# Altium footprint library Miscellaneous Header.PcbLib: 164 footprints (part 6 of 11)
Each footprint in its own frame and in the unit in brackets; x right, y up, seen from the top. Pads: shape width x height; smd on the part's side, far side on the other; paste and mask are expansions set on the pad; w line width, h text height; cw(c..) or ccw(c..) is an arc to the next point about the centre after c.
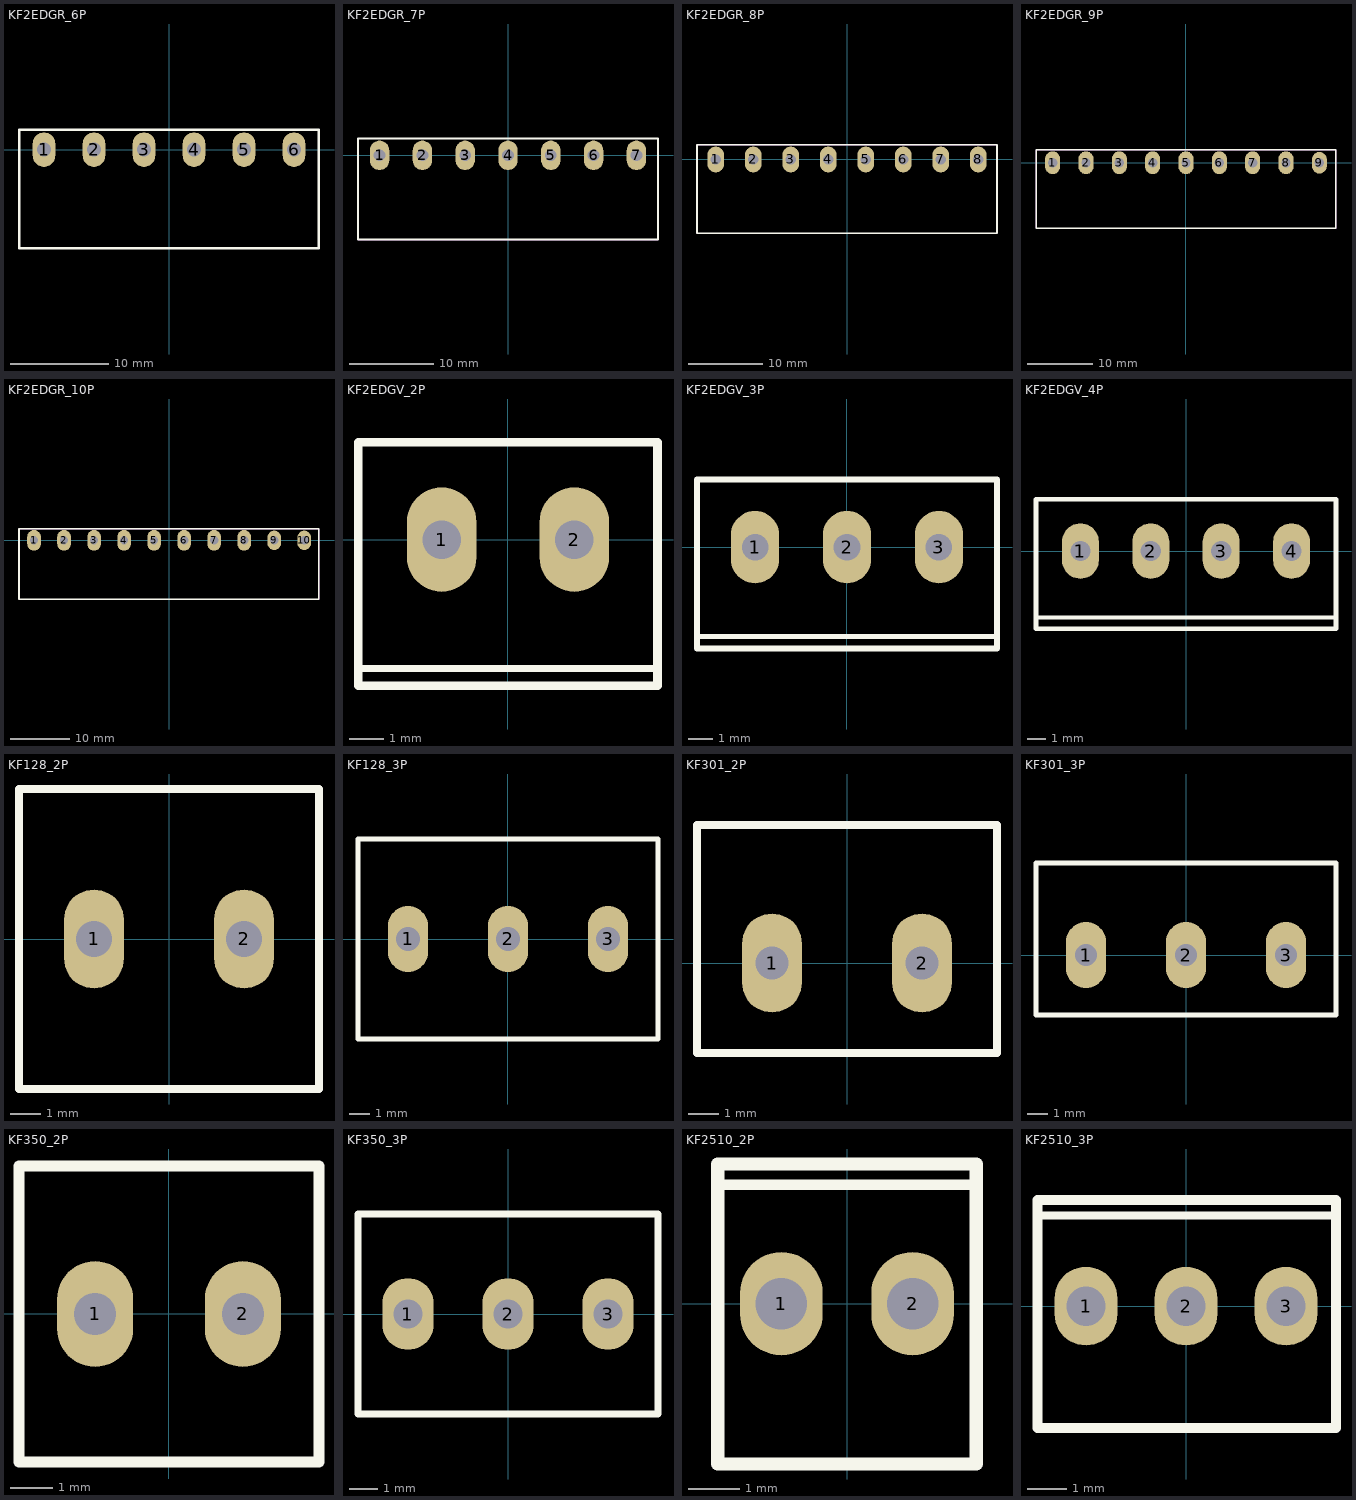
[diagram p5: the footprints below, top view; thin cyan lines are the x and y axes]

## KF2EDGR_6P [mm]
pads (6):
  oval 2.3x3.5 hole 1.4: 1(-12.7,0) 2(-7.62,0) 3(-2.54,0) 4(2.54,0) 5(7.62,0) 6(12.7,0)
Top Overlay:
  lines w0.254: -15.2,-10 -15.2,2 15.2,2 15.2,-10 -15.2,-10
Mechanical 15:
  lines w0.1: -15.24,-10 -15.24,2 15.24,2 15.24,-10 -15.24,-10
3D body: height 8.6, standoff -3.5, extent -15.24,-10.002 15.24,2

## KF2EDGR_7P [mm]
pads (7):
  oval 2.3x3.5 hole 1.4: 1(-15.24,0) 2(-10.16,0) 3(-5.08,0) 4(0,0) 5(5.08,0) 6(10.16,0) 7(15.24,0)
Top Overlay:
  lines w0.254: -17.8,-10 -17.8,2 17.8,2 17.8,-10 -17.8,-10
Mechanical 15:
  lines w0.1: -17.78,-10 17.78,-10 17.78,2 -17.78,2 -17.78,-10
3D body: height 8.6, standoff -3.5, extent -17.78,-10.002 17.78,2

## KF2EDGR_8P [mm]
pads (8):
  oval 2.3x3.5 hole 1.4: 1(-17.78,0) 2(-12.7,0) 3(-7.62,0) 4(-2.54,0) 5(2.54,0) 6(7.62,0) 7(12.7,0) 8(17.78,0)
Top Overlay:
  lines w0.254: -20.3,-10 -20.3,2 20.3,2 20.3,-10 -20.3,-10
Mechanical 15:
  lines w0.1: -20.32,-10 20.32,-10 20.32,2 -20.32,2 -20.32,-10
3D body: height 8.6, standoff -3.5, extent -20.32,-10.002 20.32,2

## KF2EDGR_9P [mm]
pads (9):
  oval 2.3x3.5 hole 1.4: 1(-20.32,0) 2(-15.24,0) 3(-10.16,0) 4(-5.08,0) 5(0,0) 6(5.08,0) 7(10.16,0) 8(15.24,0)
  oval 2.3x3.3 hole 1.4: 9(20.32,0)
Top Overlay:
  lines w0.254: -22.8,-10 22.8,-10 22.8,2 -22.8,2 -22.8,-10
Mechanical 15:
  lines w0.1: -22.86,-10 -22.86,2 22.86,2 22.86,-10 -22.86,-10
3D body: height 8.6, standoff -3.5, extent -22.86,-10.002 22.86,2

## KF2EDGR_10P [mm]
pads (10):
  oval 2.3x3.5 hole 1.4: 1(-22.86,0) 2(-17.78,0) 3(-12.7,0) 4(-7.62,0) 5(-2.54,0) 6(2.54,0) 7(7.62,0) 8(12.7,0)
  oval 2.3x3.3 hole 1.4: 9(17.78,0) 10(22.86,0)
Top Overlay:
  lines w0.254: -25.4,-10 25.3,-10 25.3,2 -25.4,2 -25.4,-10
Mechanical 15:
  lines w0.1: -25.4,-10 -25.4,2 25.36,2 25.36,-10 -25.4,-10
3D body: height 8.6, standoff -3.5, extent -25.4,-10.002 25.4,2

## KF2EDGV_2P [mm]
pads (2):
  oval 2x3 hole 1.1: 1(-1.905,0) 2(1.905,0)
Top Overlay:
  lines w0.2: -4.305,-3.7 4.295,-3.7
  lines w0.254: -4.305,-4.2 4.295,-4.2 4.295,2.8 -4.305,2.8 -4.305,-4.2
Mechanical 15:
  lines w0.1: -4.31,-4.2 4.31,-4.2 4.31,2.8 -4.31,2.8 -4.31,-4.2
3D body: height 9.2, standoff -3.5, extent -4.36,-4.2 4.35,2.8

## KF2EDGV_3P [mm]
pads (3):
  oval 2x3 hole 1.1: 1(-3.81,0) 2(0,0) 3(3.81,0)
Top Overlay:
  lines w0.2: -6.21,-3.7 6.215,-3.7
  lines w0.254: -6.21,-4.2 -6.21,2.8 6.215,2.8 6.215,-4.2 -6.21,-4.2
Mechanical 15:
  lines w0.1: -6.215,-4.2 -6.215,2.8 6.215,2.8 6.215,-4.2 -6.215,-4.2
3D body: height 9.2, standoff -3.5, extent -6.265,-4.2 6.255,2.8

## KF2EDGV_4P [mm]
pads (4):
  oval 2x3 hole 1.1: 1(-5.715,0) 2(-1.905,0) 3(1.905,0) 4(5.715,0)
Top Overlay:
  lines w0.2: -8.115,-3.6 8.12,-3.6
  lines w0.254: -8.115,-4.2 -8.115,2.8 8.12,2.8 8.12,-4.2 -8.115,-4.2
Mechanical 15:
  lines w0.1: -8.12,-4.2 -8.12,2.8 8.12,2.8 8.12,-4.2 -8.12,-4.2
3D body: height 9.2, standoff -3.5, extent -8.17,-4.2 8.16,2.8

## KF128_2P [mm]
pads (2):
  oval 2x3.3 hole 1.2: 1(-2.5,0) 2(2.5,0)
Top Overlay:
  lines w0.254: -5,-5 -5,5 5,5 5,-5 -5,-5
Mechanical 15:
  lines w0.1: -5,-5 -5,5 5,5 5,-5 -5,-5
3D body: height 14.1, standoff -4.18, extent -5.5,-5.1 5.16,4.9

## KF128_3P [mm]
pads (3):
  oval 2x3.3 hole 1.2: 1(-5,0) 2(0,0) 3(5,0)
Top Overlay:
  lines w0.254: -7.5,-5 -7.5,5 7.5,5 7.5,-5 -7.5,-5
Mechanical 15:
  lines w0.1: -7.5,-5 -7.5,5 7.5,5 7.5,-5 -7.5,-5
3D body: height 14.1, standoff -4.18, extent -8,-5.1 7.74,4.9

## KF301_2P [mm]
pads (2):
  oval 2x3.3 hole 1.1: 1(-2.5,0) 2(2.5,0)
Top Overlay:
  lines w0.254: -5,-3 5,-3 5,4.6 -5,4.6 -5,-3
Mechanical 15:
  lines w0.1: -5,-3 5,-3 5,4.6 -5,4.6 -5,-3
3D body: height 10.1, standoff -2.9, extent -5.6,-3 5,4.6

## KF301_3P [mm]
pads (3):
  oval 2x3.3 hole 1.1: 1(-5,0) 2(0,0) 3(5,0)
Top Overlay:
  lines w0.254: -7.5,-3 7.5,-3 7.5,4.6 -7.5,4.6 -7.5,-3
Mechanical 15:
  lines w0.1: -7.5,-3 7.5,-3 7.5,4.6 -7.5,4.6 -7.5,-3
3D body: height 10.5, standoff -2.5, extent -8.1,-3 7.5,4.6

## KF350_2P [mm]
pads (2):
  oval 1.8x2.5 hole 1: 1(-1.75,0) 2(1.75,0)
Top Overlay:
  lines w0.254: -3.55,-3.5 -3.55,3.5 3.55,3.5 3.55,-3.5 -3.55,-3.5
Mechanical 15:
  lines w0.1: -3.5,-3.5 3.5,-3.5 3.5,3.5 -3.5,3.5 -3.5,-3.5
3D body: height 8.4, standoff -2.9, extent -3.7,-2.9 3.5,2.9

## KF350_3P [mm]
pads (3):
  oval 1.8x2.5 hole 1: 1(-3.5,0) 2(0,0) 3(3.5,0)
Top Overlay:
  lines w0.254: -5.25,-3.5 5.25,-3.5 5.25,3.5 -5.25,3.5 -5.25,-3.5
Mechanical 15:
  lines w0.1: -5.25,-3.5 -5.25,3.5 5.25,3.5 5.25,-3.5 -5.25,-3.5
3D body: height 8.4, standoff -2.9, extent -5.45,-2.9 5.25,2.9

## KF2510_2P [mm]
pads (2):
  oval 1.6x2 hole 1: 1(-1.27,0) 2(1.27,0)
Top Overlay:
  lines w0.2: -2.5,2.3 2.5,2.3
  lines w0.254: -2.5,-3.1 -2.5,2.7 2.5,2.7 2.5,-3.1 -2.5,-3.1
Mechanical 15:
  lines w0.1: -2.54,-3.1 -2.54,2.7 2.54,2.7 2.54,-3.1 -2.54,-3.1
3D body: height 11.73, standoff -2.55, extent -2.6,-3.175 2.6,2.725

## KF2510_3P [mm]
pads (3):
  oval 1.6x2 hole 1: 1(-2.54,0) 2(0,0) 3(2.54,0)
Top Overlay:
  lines w0.2: -3.77,2.3 3.81,2.3
  lines w0.254: -3.77,-3.1 3.81,-3.1 3.81,2.7 -3.77,2.7 -3.77,-3.1
Mechanical 15:
  lines w0.1: -3.81,-3.1 3.81,-3.1 3.81,2.7 -3.81,2.7 -3.81,-3.1
3D body: height 11.73, standoff -3, extent -3.895,-3.2 3.905,2.7